# EAGLE library part PSA-5454+ (library PSA-5454+)
RF Amplifier ML AMPL / SURF MOUNT / RoHS Source: Datasheet <https://www.minicircuits.com/pdfs/PSA-5454 .pdf>
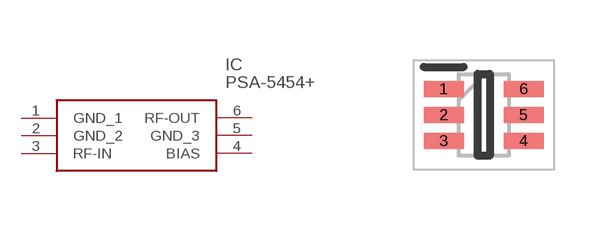
[diagram p0: symbol with the pads of SOT65P215X100-6N; footprint SOT65P215X100-6N]

Designator prefix IC

## PSA-5454+ (Description: RF Amplifier ML AMPL / SURF MOUNT / RoHS; Height: 1mm; Manufacturer_Name: Mini-Circuits; Manufacturer_Part_Number: PSA-5454+; Mouser_Part_Number: 139-PSA-5454; Mouser_Price-Stock: https://www.mouser.co.uk/ProductDetail/Mini-Circuits/PSA-5454%2b?qs=xZ%2FP%252Ba9zWqZ7vOHZyPwVpA%3D%3D)  [SOT65P215X100-6N]
1  GND_1
2  GND_2
3  RF-IN
4  BIAS
5  GND_3
6  RF-OUT

## Footprint SOT65P215X100-6N (pad centres in mm)
CA1389
smd 1 x 0.4: 1 -1,0.65; 2 -1,0; 3 -1,-0.65; 4 1,-0.65; 5 1,0; 6 1,0.65